# Altium footprint library WR-TBL_Pluggable Connector_3.81mm.PcbLib: 201 footprints (part 9 of 13)
Each footprint in its own frame and in the unit in brackets; x right, y up, seen from the top. Pads: shape width x height; smd on the part's side, far side on the other; paste and mask are expansions set on the pad; w line width, h text height; cw(c..) or ccw(c..) is an arc to the next point about the centre after c.
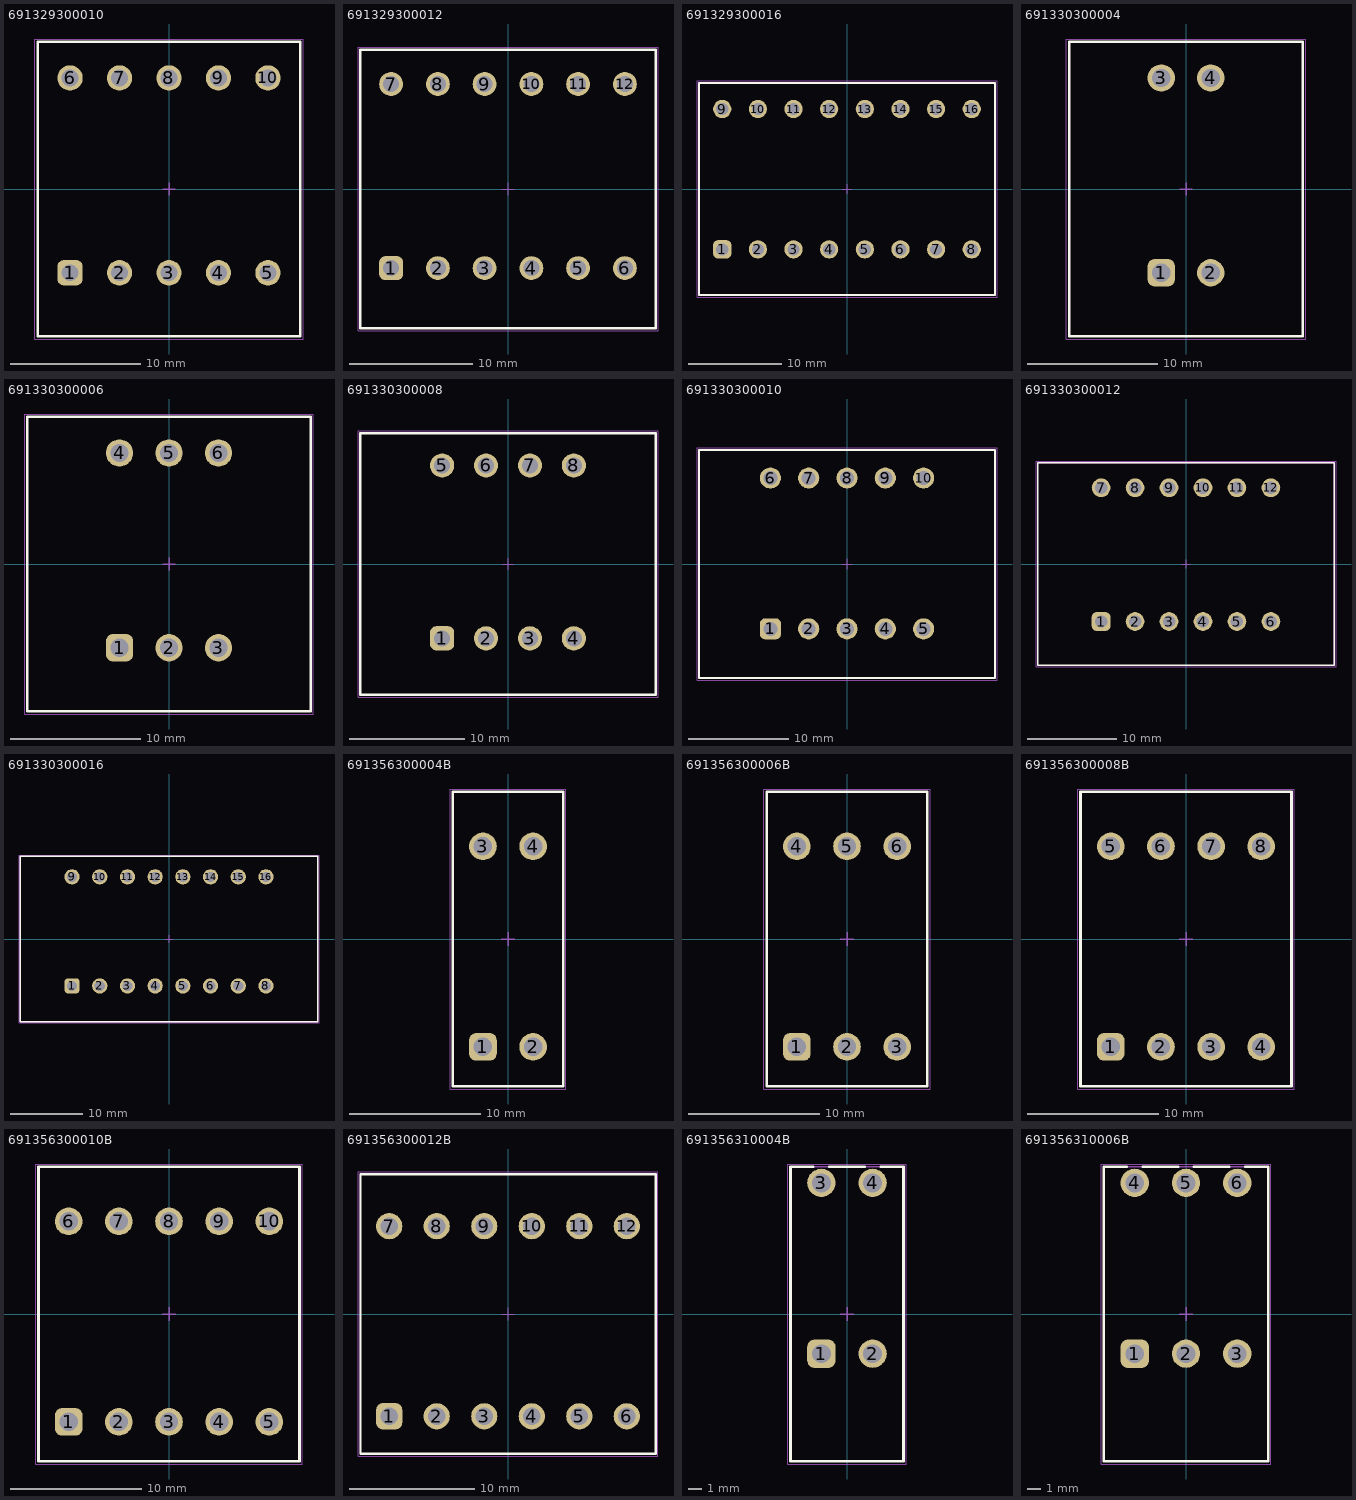
[diagram p8: the footprints below, top view; thin cyan lines are the x and y axes]

## 691329300010 [mm] "Double Level Vertical Male PCB Header, pitch 3.81mm, 10p"
height 22
pads (10):
  rrect50% 1.95x1.95 hole 1.3: 1(-7.62,-6.45)
  round 1.95 hole 1.3: 2(-3.81,-6.45) 3(0,-6.45) 4(3.81,-6.45) 5(7.62,-6.45) 6(-7.62,8.55) 7(-3.81,8.55) 8(0,8.55) 9(3.81,8.55) 10(7.62,8.55)
Top Overlay:
  lines w0.2: -10.12,-11.35 -10.12,11.35 10.12,11.35 10.12,-11.35 -10.12,-11.35
Top Assembly:
  lines w0.1: -10.12,-11.35 10.12,-11.35 10.12,11.35 -10.12,11.35 -10.12,-11.35
Top Designator:
  text ".Designator" at -3.647,-0.357 h1
Top 3D Body:
  lines w0.1: -10.12,-11.35 -10.12,11.35 10.12,11.35 10.12,-11.35 -10.12,-11.35
Top Courtyard:
  lines w0.05: -10.32,-11.55 -10.32,11.55 10.32,11.55 10.32,-11.55 -10.32,-11.55
Top Component Center:
  lines w0.1: -0.5,0 0.5,0 ; 0,-0.5 0,0.5
3D body "691329300010.stp": height 22.1, standoff -3.4, extent -10.12,-11.35 10.12,11.35

## 691329300012 [mm] "Double Level Vertical Male PCB Header, pitch 3.81mm, 12p"
height 22
pads (12):
  rrect50% 1.95x1.95 hole 1.3: 1(-9.525,-6.45)
  round 1.95 hole 1.3: 2(-5.715,-6.45) 3(-1.905,-6.45) 4(1.905,-6.45) 5(5.715,-6.45) 6(9.525,-6.45) 7(-9.525,8.55) 8(-5.715,8.55) 9(-1.905,8.55) 10(1.905,8.55) 11(5.715,8.55) 12(9.525,8.55)
Top Overlay:
  lines w0.2: -12.025,-11.35 12.025,-11.35 12.025,11.35 -12.025,11.35 -12.025,-11.35
Top Assembly:
  lines w0.1: -12.025,-11.35 -12.025,11.35 12.025,11.35 12.025,-11.35 -12.025,-11.35
Top Designator:
  text ".Designator" at -3.647,-0.357 h1
Top 3D Body:
  lines w0.1: -12.025,-11.35 12.025,-11.35 12.025,11.35 -12.025,11.35 -12.025,-11.35
Top Courtyard:
  lines w0.05: -12.225,-11.55 12.225,-11.55 12.225,11.55 -12.225,11.55 -12.225,-11.55
Top Component Center:
  lines w0.1: -0.5,0 0.5,0 ; 0,-0.5 0,0.5
3D body "691329300012.stp": height 22.1, standoff -3.4, extent -12.025,-11.35 12.025,11.35

## 691329300016 [mm] "Double Level Vertical Male PCB Header, pitch 3.81mm, 16p"
height 22
pads (16):
  rrect50% 1.95x1.95 hole 1.3: 1(-13.335,-6.45)
  round 1.95 hole 1.3: 2(-9.525,-6.45) 3(-5.715,-6.45) 4(-1.905,-6.45) 5(1.905,-6.45) 6(5.715,-6.45) 7(9.525,-6.45) 8(13.335,-6.45) 9(-13.335,8.55) 10(-9.525,8.55) 11(-5.715,8.55) 12(-1.905,8.55) 13(1.905,8.55) 14(5.715,8.55) 15(9.525,8.55) 16(13.335,8.55)
Top Overlay:
  lines w0.2: -15.835,-11.35 -15.835,11.35 15.835,11.35 15.835,-11.35 -15.835,-11.35
Top Assembly:
  lines w0.1: -15.835,-11.35 15.835,-11.35 15.835,11.35 -15.835,11.35 -15.835,-11.35
Top Designator:
  text ".Designator" at -3.647,-0.357 h1
Top 3D Body:
  lines w0.1: -15.835,-11.35 -15.835,11.35 15.835,11.35 15.835,-11.35 -15.835,-11.35
Top Courtyard:
  lines w0.05: -16.035,-11.55 -16.035,11.55 16.035,11.55 16.035,-11.55 -16.035,-11.55
Top Component Center:
  lines w0.1: -0.5,0 0.5,0 ; 0,-0.5 0,0.5
3D body "691329300016.stp": height 22.1, standoff -3.4, extent -15.835,-11.35 15.835,11.35

## 691330300004 [mm] "Double Level Vertical Male PCB Header with Flanges & Nut Type, pitch 3.81mm, 04p"
height 22
pads (4):
  rrect50% 2.1x2.1 hole 1.4: 1(-1.905,-6.45)
  round 2.1 hole 1.4: 2(1.905,-6.45) 3(-1.905,8.55) 4(1.905,8.55)
Top Overlay:
  lines w0.2: -9.005,-11.35 9.005,-11.35 9.005,11.35 -9.005,11.35 -9.005,-11.35
Top Assembly:
  lines w0.1: -9.005,-11.35 -9.005,11.35 9.005,11.35 9.005,-11.35 -9.005,-11.35
Top Designator:
  text ".Designator" at -3.647,-0.357 h1
Top 3D Body:
  lines w0.1: -9.005,-11.35 9.005,-11.35 9.005,11.35 -9.005,11.35 -9.005,-11.35
Top Courtyard:
  lines w0.05: -9.205,-11.55 9.205,-11.55 9.205,11.55 -9.205,11.55 -9.205,-11.55
Top Component Center:
  lines w0.1: -0.5,0 0.5,0 ; 0,-0.5 0,0.5
3D body "691330300004.stp": height 22.1, standoff -3.4, extent -9.005,-11.35 9.005,11.35

## 691330300006 [mm] "Double Level Vertical Male PCB Header with Flanges & Nut Type, pitch 3.81mm, 06p"
height 22
pads (6):
  rrect50% 2.1x2.1 hole 1.4: 1(-3.81,-6.45)
  round 2.1 hole 1.4: 2(0,-6.45) 3(3.81,-6.45) 4(-3.81,8.55) 5(0,8.55) 6(3.81,8.55)
Top Overlay:
  lines w0.2: -10.91,-11.35 10.91,-11.35 10.91,11.35 -10.91,11.35 -10.91,-11.35
Top Assembly:
  lines w0.1: -10.91,-11.35 -10.91,11.35 10.91,11.35 10.91,-11.35 -10.91,-11.35
Top Designator:
  text ".Designator" at -3.647,-0.357 h1
Top 3D Body:
  lines w0.1: -10.91,-11.35 10.91,-11.35 10.91,11.35 -10.91,11.35 -10.91,-11.35
Top Courtyard:
  lines w0.05: -11.11,-11.55 11.11,-11.55 11.11,11.55 -11.11,11.55 -11.11,-11.55
Top Component Center:
  lines w0.1: -0.5,0 0.5,0 ; 0,-0.5 0,0.5
3D body "691330300006.stp": height 22.1, standoff -3.4, extent -10.91,-11.35 10.91,11.35

## 691330300008 [mm] "Double Level Vertical Male PCB Header with Flanges & Nut Type, pitch 3.81mm, 08p"
height 22
pads (8):
  rrect50% 2.1x2.1 hole 1.4: 1(-5.715,-6.45)
  round 2.1 hole 1.4: 2(-1.905,-6.45) 3(1.905,-6.45) 4(5.715,-6.45) 5(-5.715,8.55) 6(-1.905,8.55) 7(1.905,8.55) 8(5.715,8.55)
Top Overlay:
  lines w0.2: -12.815,-11.35 -12.815,11.35 12.815,11.35 12.815,-11.35 -12.815,-11.35
Top Assembly:
  lines w0.1: -12.815,-11.35 12.815,-11.35 12.815,11.35 -12.815,11.35 -12.815,-11.35
Top Designator:
  text ".Designator" at -3.647,-0.357 h1
Top 3D Body:
  lines w0.1: -12.815,-11.35 -12.815,11.35 12.815,11.35 12.815,-11.35 -12.815,-11.35
Top Courtyard:
  lines w0.05: -13.015,-11.55 -13.015,11.55 13.015,11.55 13.015,-11.55 -13.015,-11.55
Top Component Center:
  lines w0.1: -0.5,0 0.5,0 ; 0,-0.5 0,0.5
3D body "691330300008.stp": height 22.1, standoff -3.4, extent -12.815,-11.35 12.815,11.35

## 691330300010 [mm] "Double Level Vertical Male PCB Header with Flanges & Nut Type, pitch 3.81mm, 10p"
height 22
pads (10):
  rrect50% 2.1x2.1 hole 1.4: 1(-7.62,-6.45)
  round 2.1 hole 1.4: 2(-3.81,-6.45) 3(0,-6.45) 4(3.81,-6.45) 5(7.62,-6.45) 6(-7.62,8.55) 7(-3.81,8.55) 8(0,8.55) 9(3.81,8.55) 10(7.62,8.55)
Top Overlay:
  lines w0.2: -14.72,-11.35 -14.72,11.35 14.72,11.35 14.72,-11.35 -14.72,-11.35
Top Assembly:
  lines w0.1: -14.72,-11.35 14.72,-11.35 14.72,11.35 -14.72,11.35 -14.72,-11.35
Top Designator:
  text ".Designator" at -3.647,-0.357 h1
Top 3D Body:
  lines w0.1: -14.72,-11.35 -14.72,11.35 14.72,11.35 14.72,-11.35 -14.72,-11.35
Top Courtyard:
  lines w0.05: -14.92,-11.55 -14.92,11.55 14.92,11.55 14.92,-11.55 -14.92,-11.55
Top Component Center:
  lines w0.1: -0.5,0 0.5,0 ; 0,-0.5 0,0.5
3D body "691330300010.stp": height 22.1, standoff -3.4, extent -14.72,-11.35 14.72,11.35

## 691330300012 [mm] "Double Level Vertical Male PCB Header with Flanges & Nut Type, pitch 3.81mm, 12p"
height 22
pads (12):
  rrect50% 2.1x2.1 hole 1.4: 1(-9.525,-6.45)
  round 2.1 hole 1.4: 2(-5.715,-6.45) 3(-1.905,-6.45) 4(1.905,-6.45) 5(5.715,-6.45) 6(9.525,-6.45) 7(-9.525,8.55) 8(-5.715,8.55) 9(-1.905,8.55) 10(1.905,8.55) 11(5.715,8.55) 12(9.525,8.55)
Top Overlay:
  lines w0.2: -16.625,-11.35 16.625,-11.35 16.625,11.35 -16.625,11.35 -16.625,-11.35
Top Assembly:
  lines w0.1: -16.625,-11.35 -16.625,11.35 16.625,11.35 16.625,-11.35 -16.625,-11.35
Top Designator:
  text ".Designator" at -3.647,-0.357 h1
Top 3D Body:
  lines w0.1: -16.625,-11.35 16.625,-11.35 16.625,11.35 -16.625,11.35 -16.625,-11.35
Top Courtyard:
  lines w0.05: -16.825,-11.55 16.825,-11.55 16.825,11.55 -16.825,11.55 -16.825,-11.55
Top Component Center:
  lines w0.1: -0.5,0 0.5,0 ; 0,-0.5 0,0.5
3D body "691330300012.stp": height 22.1, standoff -3.4, extent -16.625,-11.35 16.625,11.35

## 691330300016 [mm] "Double Level Vertical Male PCB Header with Flanges & Nut Type, pitch 3.81mm, 16p"
height 22
pads (16):
  rrect50% 2.1x2.1 hole 1.4: 1(-13.335,-6.45)
  round 2.1 hole 1.4: 2(-9.525,-6.45) 3(-5.715,-6.45) 4(-1.905,-6.45) 5(1.905,-6.45) 6(5.715,-6.45) 7(9.525,-6.45) 8(13.335,-6.45) 9(-13.335,8.55) 10(-9.525,8.55) 11(-5.715,8.55) 12(-1.905,8.55) 13(1.905,8.55) 14(5.715,8.55) 15(9.525,8.55) 16(13.335,8.55)
Top Overlay:
  lines w0.2: -20.435,-11.35 -20.435,11.35 20.435,11.35 20.435,-11.35 -20.435,-11.35
Top Assembly:
  lines w0.1: -20.435,-11.35 20.435,-11.35 20.435,11.35 -20.435,11.35 -20.435,-11.35
Top Designator:
  text ".Designator" at -3.647,-0.357 h1
Top 3D Body:
  lines w0.1: -20.435,-11.35 -20.435,11.35 20.435,11.35 20.435,-11.35 -20.435,-11.35
Top Courtyard:
  lines w0.05: -20.635,-11.55 -20.635,11.55 20.635,11.55 20.635,-11.55 -20.635,-11.55
Top Component Center:
  lines w0.1: -0.5,0 0.5,0 ; 0,-0.5 0,0.5
3D body "691330300016.stp": height 22.1, standoff -3.4, extent -20.435,-11.35 20.435,11.35

## 691356300004B [mm] "Double Level Vertical Male PCB Header, pitch 3.81mm, 04p"
height 21.9
pads (4):
  rrect50% 2.1x2.1 hole 1.4: 1(-1.905,-8.2)
  round 2.1 hole 1.4: 2(1.905,-8.2) 3(-1.905,7.04) 4(1.905,7.04)
Top Overlay:
  lines w0.2: -4.205,-11.2 4.205,-11.2 4.205,11.2 -4.205,11.2 -4.205,-11.2
Top Assembly:
  lines w0.1: -4.205,-11.2 -4.205,11.2 4.205,11.2 4.205,-11.2 -4.205,-11.2
Top Designator:
  text ".Designator" at -3.647,-0.357 h1
Top 3D Body:
  lines w0.1: -4.205,-11.2 4.205,-11.2 4.205,11.2 -4.205,11.2 -4.205,-11.2
Top Courtyard:
  lines w0.05: -4.405,-11.4 4.405,-11.4 4.405,11.4 -4.405,11.4 -4.405,-11.4
Top Component Center:
  lines w0.1: -0.5,0 0.5,0 ; 0,-0.5 0,0.5
3D body "691356300004B.stp": height 21.95, standoff -3.35, extent -4.205,-11.2 4.205,11.2

## 691356300006B [mm] "Double Level Vertical Male PCB Header, pitch 3.81mm, 06p"
height 21.9
pads (6):
  rrect50% 2.1x2.1 hole 1.4: 1(-3.81,-8.2)
  round 2.1 hole 1.4: 2(0,-8.2) 3(3.81,-8.2) 4(-3.81,7.04) 5(0,7.04) 6(3.81,7.04)
Top Overlay:
  lines w0.2: -6.11,-11.2 -6.11,11.2 6.11,11.2 6.11,-11.2 -6.11,-11.2
Top Assembly:
  lines w0.1: -6.11,-11.2 6.11,-11.2 6.11,11.2 -6.11,11.2 -6.11,-11.2
Top Designator:
  text ".Designator" at -3.647,-0.357 h1
Top 3D Body:
  lines w0.1: -6.11,-11.2 -6.11,11.2 6.11,11.2 6.11,-11.2 -6.11,-11.2
Top Courtyard:
  lines w0.05: -6.31,-11.4 -6.31,11.4 6.31,11.4 6.31,-11.4 -6.31,-11.4
Top Component Center:
  lines w0.1: -0.5,0 0.5,0 ; 0,-0.5 0,0.5
3D body "691356300006B.stp": height 21.95, standoff -3.35, extent -6.11,-11.2 6.11,11.2

## 691356300008B [mm] "Double Level Vertical Male PCB Header, pitch 3.81mm, 08p"
height 21.9
pads (8):
  rrect50% 2.1x2.1 hole 1.4: 1(-5.715,-8.2)
  round 2.1 hole 1.4: 2(-1.905,-8.2) 3(1.905,-8.2) 4(5.715,-8.2) 5(-5.715,7.04) 6(-1.905,7.04) 7(1.905,7.04) 8(5.715,7.04)
Top Overlay:
  lines w0.2: -8.015,-11.2 8.015,-11.2 8.015,11.2 -8.015,11.2 -8.015,-11.2
Top Assembly:
  lines w0.1: -8.015,-11.2 -8.015,11.2 8.015,11.2 8.015,-11.2 -8.015,-11.2
Top Designator:
  text ".Designator" at -3.647,-0.357 h1
Top 3D Body:
  lines w0.1: -8.015,-11.2 8.015,-11.2 8.015,11.2 -8.015,11.2 -8.015,-11.2
Top Courtyard:
  lines w0.05: -8.215,-11.4 8.215,-11.4 8.215,11.4 -8.215,11.4 -8.215,-11.4
Top Component Center:
  lines w0.1: -0.5,0 0.5,0 ; 0,-0.5 0,0.5
3D body "691356300008B.stp": height 21.95, standoff -3.35, extent -8.015,-11.2 8.015,11.2

## 691356300010B [mm] "Double Level Vertical Male PCB Header, pitch 3.81mm, 10p"
height 21.9
pads (10):
  rrect50% 2.1x2.1 hole 1.4: 1(-7.62,-8.2)
  round 2.1 hole 1.4: 2(-3.81,-8.2) 3(0,-8.2) 4(3.81,-8.2) 5(7.62,-8.2) 6(-7.62,7.04) 7(-3.81,7.04) 8(0,7.04) 9(3.81,7.04) 10(7.62,7.04)
Top Overlay:
  lines w0.2: -9.92,-11.2 -9.92,11.2 9.92,11.2 9.92,-11.2 -9.92,-11.2
Top Assembly:
  lines w0.1: -9.92,-11.2 9.92,-11.2 9.92,11.2 -9.92,11.2 -9.92,-11.2
Top Designator:
  text ".Designator" at -3.647,-0.357 h1
Top 3D Body:
  lines w0.1: -9.92,-11.2 -9.92,11.2 9.92,11.2 9.92,-11.2 -9.92,-11.2
Top Courtyard:
  lines w0.05: -10.12,-11.4 -10.12,11.4 10.12,11.4 10.12,-11.4 -10.12,-11.4
Top Component Center:
  lines w0.1: -0.5,0 0.5,0 ; 0,-0.5 0,0.5
3D body "691356300010B.stp": height 21.95, standoff -3.35, extent -9.92,-11.2 9.92,11.2

## 691356300012B [mm] "Double Level Vertical Male PCB Header, pitch 3.81mm, 12p"
height 21.9
pads (12):
  rrect50% 2.1x2.1 hole 1.4: 1(-9.525,-8.2)
  round 2.1 hole 1.4: 2(-5.715,-8.2) 3(-1.905,-8.2) 4(1.905,-8.2) 5(5.715,-8.2) 6(9.525,-8.2) 7(-9.525,7.04) 8(-5.715,7.04) 9(-1.905,7.04) 10(1.905,7.04) 11(5.715,7.04) 12(9.525,7.04)
Top Overlay:
  lines w0.2: -11.825,-11.2 -11.825,11.2 11.825,11.2 11.825,-11.2 -11.825,-11.2
Top Assembly:
  lines w0.1: -11.825,-11.2 11.825,-11.2 11.825,11.2 -11.825,11.2 -11.825,-11.2
Top Designator:
  text ".Designator" at -3.647,-0.357 h1
Top 3D Body:
  lines w0.1: -11.825,-11.2 -11.825,11.2 11.825,11.2 11.825,-11.2 -11.825,-11.2
Top Courtyard:
  lines w0.05: -12.025,-11.4 -12.025,11.4 12.025,11.4 12.025,-11.4 -12.025,-11.4
Top Component Center:
  lines w0.1: -0.5,0 0.5,0 ; 0,-0.5 0,0.5
3D body "691356300012B.stp": height 21.95, standoff -3.35, extent -11.825,-11.2 11.825,11.2

## 691356310004B [mm] "Double Level Horizontal Male PCB Header, pitch 3.81mm, 04p"
height 22.4
pads (4):
  rrect50% 2.1x2.1 hole 1.4: 1(-1.905,-2.95)
  round 2.1 hole 1.4: 2(1.905,-2.95) 3(-1.905,9.75) 4(1.905,9.75)
Top Overlay:
  lines w0.2: -2.505,10.95 -4.205,10.95 -4.205,-10.95 4.205,-10.95 4.205,10.95 2.505,10.95 ; -1.305,10.95 1.305,10.95
Top Assembly:
  lines w0.1: -4.205,-10.95 -4.205,10.95 4.205,10.95 4.205,-10.95 -4.205,-10.95
Top Designator:
  text ".Designator" at -3.647,-0.357 h1
Top 3D Body:
  lines w0.1: -4.205,-10.95 4.205,-10.95 4.205,10.95 -4.205,10.95 -4.205,-10.95
Top Courtyard:
  lines w0.05: -4.405,-11.15 -4.405,11.15 4.405,11.15 4.405,-11.15 -4.405,-11.15
Top Component Center:
  lines w0.1: -0.5,0 0.5,0 ; 0,-0.5 0,0.5
3D body "691356310004B.stp": height 22.5, standoff -3.3, extent -4.205,-10.95 4.205,10.95

## 691356310006B [mm] "Double Level Horizontal Male PCB Header, pitch 3.81mm, 06p"
height 22.4
pads (6):
  rrect50% 2.1x2.1 hole 1.4: 1(-3.81,-2.95)
  round 2.1 hole 1.4: 2(0,-2.95) 3(3.81,-2.95) 4(-3.81,9.75) 5(0,9.75) 6(3.81,9.75)
Top Overlay:
  lines w0.2: -4.41,10.95 -6.11,10.95 -6.11,-10.95 6.11,-10.95 6.11,10.95 4.41,10.95 ; -3.21,10.95 -0.6,10.95 ; 0.6,10.95 3.21,10.95
Top Assembly:
  lines w0.1: -6.11,-10.95 6.11,-10.95 6.11,10.95 -6.11,10.95 -6.11,-10.95
Top Designator:
  text ".Designator" at -3.647,-0.357 h1
Top 3D Body:
  lines w0.1: -6.11,-10.95 -6.11,10.95 6.11,10.95 6.11,-10.95 -6.11,-10.95
Top Courtyard:
  lines w0.05: -6.31,-11.15 6.31,-11.15 6.31,11.15 -6.31,11.15 -6.31,-11.15
Top Component Center:
  lines w0.1: -0.5,0 0.5,0 ; 0,-0.5 0,0.5
3D body "691356310006B.stp": height 22.5, standoff -3.3, extent -6.11,-10.95 6.11,10.95